# Altium footprint library LM65645RZTR.PcbLib: 1 footprints
Each footprint in its own frame and in the unit in brackets; x right, y up, seen from the top. Pads: shape width x height; smd on the part's side, far side on the other; paste and mask are expansions set on the pad; w line width, h text height; cw(c..) or ccw(c..) is an arc to the next point about the centre after c.
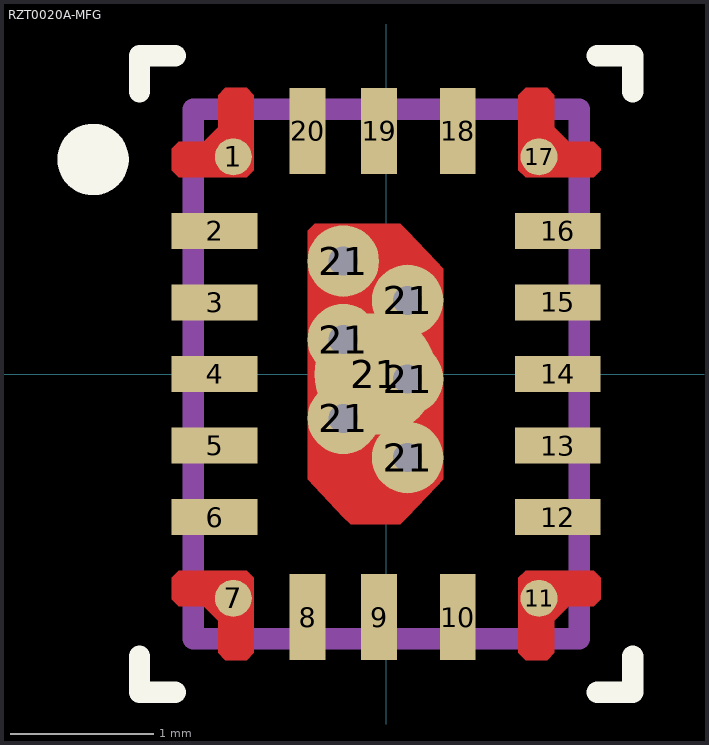
[diagram p0: the footprint, top view; thin cyan lines are the x and y axes]

## RZT0020A-MFG [mm]
pads (27):
  round 0.259 smd paste+0 mask+0: 1(-1.069,1.519) 7(-1.069,-1.569) 11(1.069,-1.569) 17(1.069,1.519)
  rect 0.6x0.25 smd paste+0 mask+0: 2(-1.2,1) 3(-1.2,0.5) 4(-1.2,0) 5(-1.2,-0.5) 6(-1.2,-1) 12(1.2,-1) 13(1.2,-0.5) 14(1.2,0) 15(1.2,0.5) 16(1.2,1)
  rect 0.25x0.6 smd paste+0 mask+0: 8(-0.55,-1.7) 9(-0.05,-1.7) 10(0.5,-1.7) 18(0.5,1.7) 19(-0.05,1.7) 20(-0.55,1.7)
  round 0.5 hole 0.203 paste-2539.97 mask+0: 21(-0.3,-0.31) 21(-0.3,0.24) 21(-0.3,0.79) 21(0.15,-0.585) 21(0.15,-0.035) 21(0.15,0.515)
  round 0.855 smd paste-0.415 mask+0: 21(-0.075,0)
Top Layer:
  region: -0.975,1.375 -1.45,1.375 -1.5,1.425 -1.5,1.575 -1.45,1.625 -1.275,1.625 -1.175,1.725 -1.175,1.95 -1.125,2 -0.975,2 -0.925,1.95 -0.925,1.425
  region: -0.975,-1.375 -1.45,-1.375 -1.5,-1.425 -1.5,-1.575 -1.45,-1.625 -1.275,-1.625 -1.175,-1.725 -1.175,-1.95 -1.125,-2 -0.975,-2 -0.925,-1.95 -0.925,-1.425
  region: 0.975,-1.375 1.45,-1.375 1.5,-1.425 1.5,-1.575 1.45,-1.625 1.275,-1.625 1.175,-1.725 1.175,-1.95 1.125,-2 0.975,-2 0.925,-1.95 0.925,-1.425
  region: 0.975,1.375 1.45,1.375 1.5,1.425 1.5,1.575 1.45,1.625 1.275,1.625 1.175,1.725 1.175,1.95 1.125,2 0.975,2 0.925,1.95 0.925,1.425
  region: -0.55,-0.735 -0.55,1 -0.5,1.05 0.099,1.05 0.149,1.001 0.354,0.785 0.4,0.735 0.4,-0.735 0.354,-0.785 0.149,-1.001 0.099,-1.05 -0.249,-1.05 -0.299,-1.001 -0.504,-0.785
Top Overlay:
  circle w0.25: c-2.05,1.5 r0.125
  lines w0.15: -1.725,-1.975 -1.725,-2.225 -1.475,-2.225 ; -1.725,1.975 -1.725,2.225 -1.475,2.225 ; 1.475,-2.225 1.725,-2.225 1.725,-1.975 ; 1.475,2.225 1.725,2.225 1.725,1.975
Top Paste:
  region: 0.325,-0.135 -0.475,-0.135 -0.525,-0.185 -0.525,-0.718 -0.479,-0.768 -0.279,-0.993 -0.229,-1.04 0.079,-1.04 0.129,-0.993 0.329,-0.768 0.375,-0.718 0.375,-0.185
  region: 0.325,0.065 -0.475,0.065 -0.525,0.115 -0.525,0.99 -0.475,1.04 0.079,1.04 0.129,0.993 0.329,0.768 0.375,0.718 0.375,0.115
  region: -0.975,1.375 -1.45,1.375 -1.5,1.425 -1.5,1.575 -1.45,1.625 -1.275,1.625 -1.175,1.725 -1.175,1.95 -1.125,2 -0.975,2 -0.925,1.95 -0.925,1.425
  region: -1.5,-1.425 -1.45,-1.375 -0.975,-1.375 -0.925,-1.425 -0.925,-1.95 -0.975,-2 -1.125,-2 -1.175,-1.95 -1.175,-1.725 -1.275,-1.625 -1.45,-1.625 -1.5,-1.575
  region: 0.975,-1.375 1.45,-1.375 1.5,-1.425 1.5,-1.575 1.45,-1.625 1.275,-1.625 1.175,-1.725 1.175,-1.95 1.125,-2 0.975,-2 0.925,-1.95 0.925,-1.425
  region: 1.5,1.425 1.45,1.375 0.975,1.375 0.925,1.425 0.925,1.95 0.975,2 1.125,2 1.175,1.95 1.175,1.725 1.275,1.625 1.45,1.625 1.5,1.575
Top Solder:
  region: -0.975,1.375 -1.45,1.375 -1.5,1.425 -1.5,1.575 -1.45,1.625 -1.275,1.625 -1.175,1.725 -1.175,1.95 -1.125,2 -0.975,2 -0.925,1.95 -0.925,1.425
  region: -1.5,-1.425 -1.45,-1.375 -0.975,-1.375 -0.925,-1.425 -0.925,-1.95 -0.975,-2 -1.125,-2 -1.175,-1.95 -1.175,-1.725 -1.275,-1.625 -1.45,-1.625 -1.5,-1.575
  region: 0.975,-1.375 1.45,-1.375 1.5,-1.425 1.5,-1.575 1.45,-1.625 1.275,-1.625 1.175,-1.725 1.175,-1.95 1.125,-2 0.975,-2 0.925,-1.95 0.925,-1.425
  region: 1.5,1.425 1.45,1.375 0.975,1.375 0.925,1.425 0.925,1.95 0.975,2 1.125,2 1.175,1.95 1.175,1.725 1.275,1.625 1.45,1.625 1.5,1.575
  region: -0.55,-0.735 -0.55,1 -0.5,1.05 0.099,1.05 0.149,1.001 0.354,0.785 0.4,0.735 0.4,-0.735 0.354,-0.785 0.149,-1.001 0.099,-1.05 -0.249,-1.05 -0.299,-1.001 -0.504,-0.785
Mechanical 13:
  lines w0.15: -1.35,-1.85 1.35,-1.85 1.35,1.85 -1.35,1.85 -1.35,-1.85